# Altium footprint library Connector-Audio-Video.PcbLib: 24 footprints (part 1 of 2)
Each footprint in its own frame and in the unit in brackets; x right, y up, seen from the top. Pads: shape width x height; smd on the part's side, far side on the other; paste and mask are expansions set on the pad; w line width, h text height; cw(c..) or ccw(c..) is an arc to the next point about the centre after c.
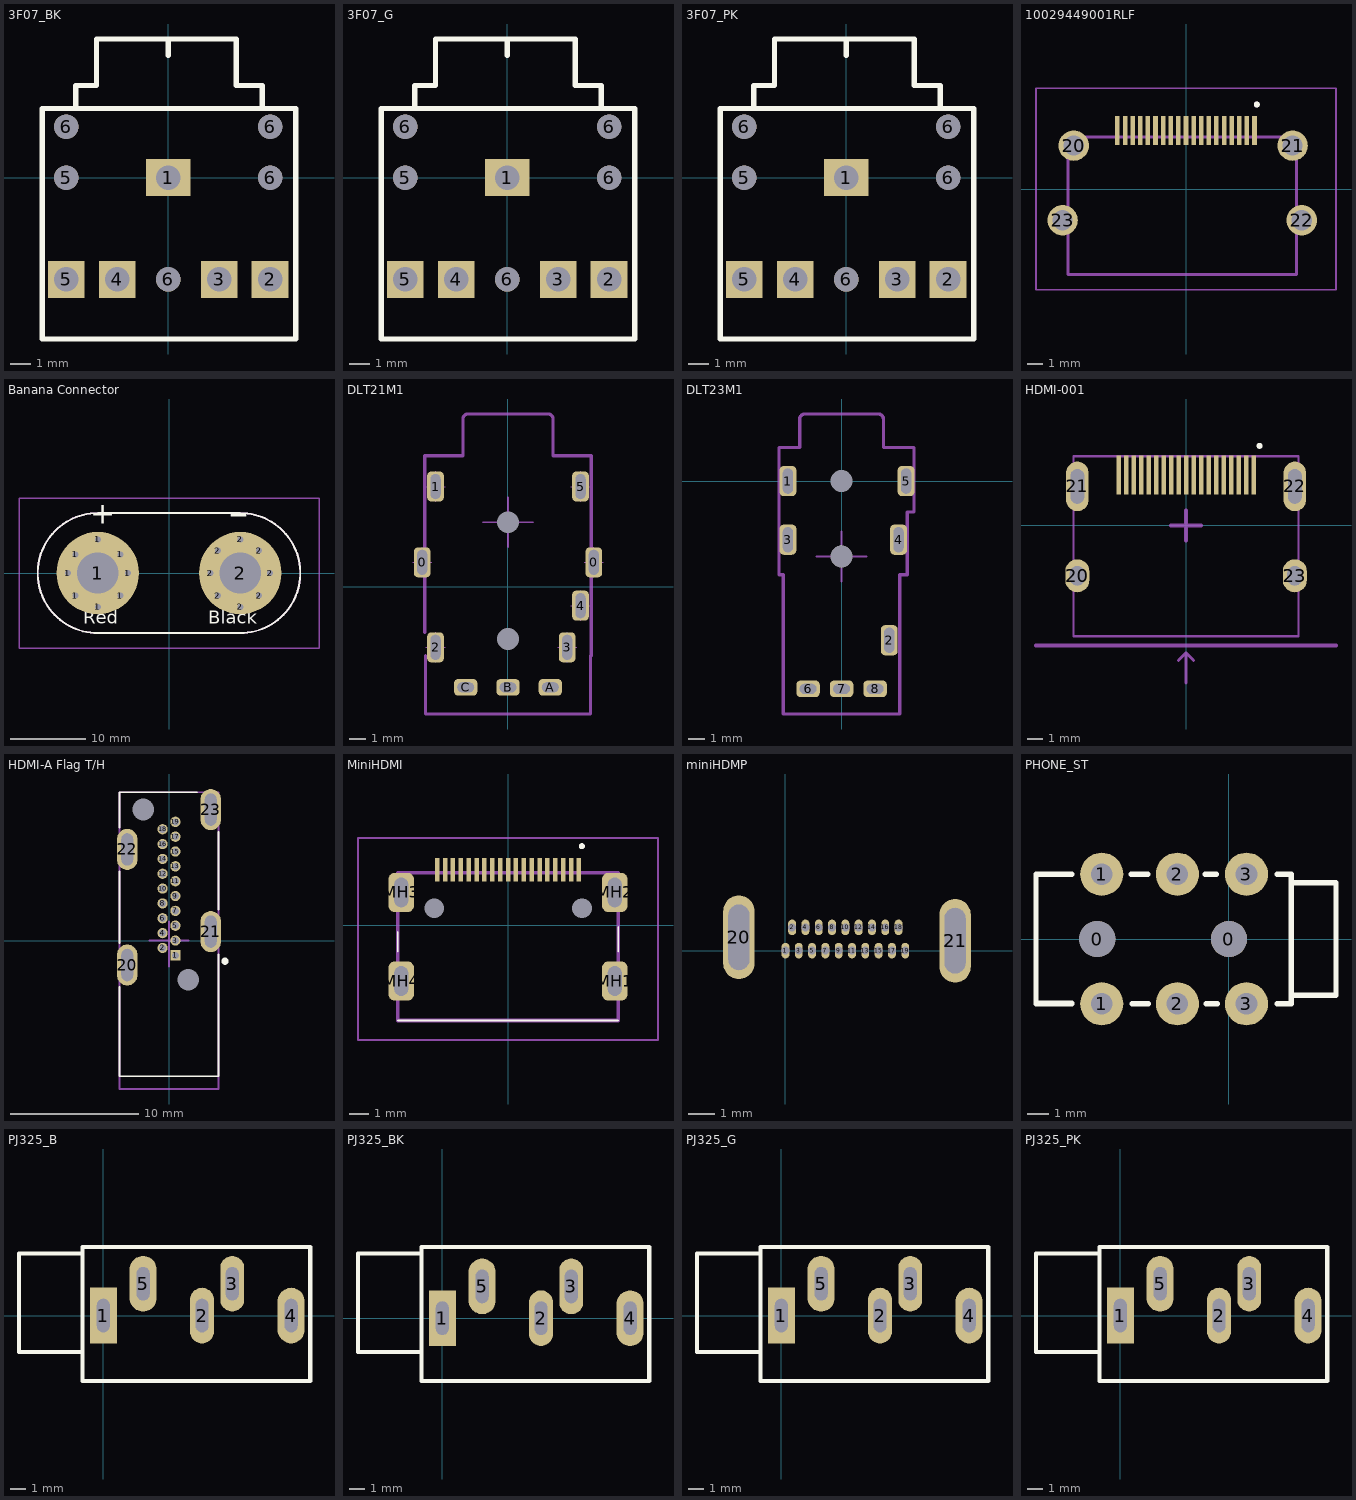
[diagram p0: the footprints below, top view; thin cyan lines are the x and y axes]

## 3F07_BK [mm] "黑色，14.2*12*5mm"
pads (10):
  rect 2.2x1.8 hole 1.2: 1(0,0)
  rect 1.8x1.8 hole 1.2: 2(5,-5) 3(2.5,-5) 4(-2.5,-5) 5(-5,-5)
  round 1.2 hole 1.2 unplated: 5(-5,0) 6(-5,2.5) 6(0,-5) 6(5,0) 6(5,2.5)
Top Overlay:
  lines w0.254: -4.532,3.382 -4.532,4.525 -3.516,4.525 -3.516,6.8 3.342,6.8 3.342,4.525 4.612,4.525 4.612,3.382 ; 0,6 0,6.8 ; -6.183,-7.921 -6.183,3.382 6.263,3.382 6.263,-7.921 -6.183,-7.921
3D body "3F07_BK-.STEP": height 5.6, standoff -2.9, extent -5.969,-7.735 6.031,6.465

## 3F07_G [mm] "绿色，14.2*12*5mm"
pads (10):
  rect 2.2x1.8 hole 1.2: 1(0,0)
  rect 1.8x1.8 hole 1.2: 2(5,-5) 3(2.5,-5) 4(-2.5,-5) 5(-5,-5)
  round 1.2 hole 1.2 unplated: 5(-5,0) 6(-5,2.5) 6(0,-5) 6(5,0) 6(5,2.5)
Top Overlay:
  lines w0.254: -4.532,3.382 -4.532,4.525 -3.516,4.525 -3.516,6.8 3.342,6.8 3.342,4.525 4.612,4.525 4.612,3.382 ; 0,6 0,6.8 ; -6.183,-7.921 6.263,-7.921 6.263,3.382 -6.183,3.382 -6.183,-7.921
3D body "3F07_G-.STEP": height 5.6, standoff -2.9, extent -5.969,-7.735 6.031,6.465

## 3F07_PK [mm] "粉色，14.2*12*5mm"
pads (10):
  rect 2.2x1.8 hole 1.2: 1(0,0)
  rect 1.8x1.8 hole 1.2: 2(5,-5) 3(2.5,-5) 4(-2.5,-5) 5(-5,-5)
  round 1.2 hole 1.2 unplated: 5(-5,0) 6(-5,2.5) 6(0,-5) 6(5,0) 6(5,2.5)
Top Overlay:
  lines w0.254: -4.532,3.382 -4.532,4.525 -3.516,4.525 -3.516,6.8 3.342,6.8 3.342,4.525 4.612,4.525 4.612,3.382 ; 0,6 0,6.8 ; -6.183,-7.921 6.263,-7.921 6.263,3.382 -6.183,3.382 -6.183,-7.921
3D body "3F07_PK-.STEP": height 5.6, standoff -2.9, extent -6.031,-7.608 5.969,6.592

## 10029449001RLF [mm]
pads (23):
  rect 0.3x1.9 smd: 1(4.499,3.85) 2(3.999,3.85) 3(3.499,3.85) 4(2.999,3.85) 5(2.499,3.85) 6(1.999,3.85) 7(1.499,3.85) 8(0.999,3.85) 9(0.499,3.85) 10(-0.001,3.85) 11(-0.501,3.85) 12(-1.001,3.85) 13(-1.501,3.85) 14(-2.001,3.85) 15(-2.501,3.85) 16(-3.001,3.85) 17(-3.501,3.85) 18(-4.001,3.85) 19(-4.501,3.85)
  round 1.995 hole 1.33: 20(-7.366,2.85) 21(6.999,2.85) 22(7.599,-2.05) 23(-8.101,-2.05)
Top Overlay:
  lines w0.3: 4.649,5.5 ccw(c4.649,5.55) 4.649,5.6 ccw(c4.649,5.55) 4.649,5.5
Body Extra:
  lines w0.2: -7.751,-5.6 7.249,-5.6 7.249,3.4 -7.751,3.4 -7.751,-5.6
Bottom Courtyard:
  lines w0.1: -9.848,-6.6 9.848,-6.6 9.848,6.6 -9.848,6.6 -9.848,-6.6
Mechanical 29:
  lines w0.1: -9.848,-6.6 -9.848,6.6 9.848,6.6 9.848,-6.6 -9.848,-6.6
  lines w0.3: 4.649,5.5 cw(c4.649,5.55) 4.649,5.6
3D body "User Library-10029449-001LF.STEP": height 6.28, standoff -1.72, extent -8.354,-5.588 7.846,4.312

## Banana Connector [mm]
pads (18):
  round 1.524 hole 0.8: 1(-13.5,0) 1(-12.5,-3) 1(-12.5,2.5) 1(-9.5,-4.5) 1(-9.5,4.5) 1(-6.5,-3) 1(-6.5,2.5) 1(-5.5,0) 2(5.5,0) 2(6.5,-3) 2(6.5,3) 2(9.5,-4.5) 2(9.5,4.5) 2(12,-3) 2(12,3) 2(13.5,0)
  round 11 hole 5.5: 1(-9.5,0) 2(9.5,0)
Top Overlay:
  lines w0.254: -9.5,8 9.5,8.001 cw(c9.5,0) 9.499,-8.001 -9.5,-8.001 cw(c-9.499,0) -9.499,8.001
  text "Red" at -11.401,-7.372 h3
  text "Black" at 5.222,-7.372 h3
  text "+" at -10.498,5.566 h5
  text "_" at 8.327,7.427 h5
Bottom Overlay:
  lines w0.254: -9.5,8 9.5,8.001 cw(c9.5,0) 9.499,-8.001 -9.5,-8.001 cw(c-9.499,0) -9.499,8.001
Top Component Outline:
  lines w0.254: -9.5,-8.001 cw(c-9.499,0) -9.499,8.001 9.5,8.001 cw(c9.5,0) 9.499,-8.001 -9.5,-8.001
Top Value:
  text "'.Comment'" at -8.64,-1.164 h4
Top Designator:
  text "='.Designator'" at -12.658,-0.838 h4
Top Courtyard:
  lines w0.2: -20,-10 20,-10 20,10 -20,10 -20,-10
3D body "功放链接座子-香蕉座.sldprt": height 29.06, standoff -23.37, extent -18.007,-8.4 17.807,8.364

## DLT21M1 [mm] "3.5 TosLink connector"
pads (12):
  rrect50% 1x1.8 hole 1.5 slot 0.6 at 0 deg unplated: 0(-5.15,1.475) 0(5.15,1.475) 1(-4.35,6.025) 2(-4.35,-3.625) 3(3.55,-3.625) 4(4.35,-1.125) 5(4.35,6.025)
  rrect50% 1.4x1 hole 1 slot 0.6 at 90 deg unplated: A(2.54,-6.025) B(0,-6.025) C(-2.54,-6.025)
  round 0 hole 1.3 unplated: ""(0,-3.125) ""(0,3.875)
Board Outline:
  lines w0.013: -5.728,1.475 -4.572,1.475 ; -5.15,0.57 -5.15,2.38 ; -4.928,-3.625 -3.772,-3.625 ; -4.928,6.025 -3.772,6.025 ; -4.35,-4.53 -4.35,-2.72 ; -4.35,5.12 -4.35,6.93 ; -3.034,-6.025 -2.046,-6.025 ; -2.54,-6.356 -2.54,-5.694 ; -0.494,-6.025 0.494,-6.025 ; 0,-6.356 0,-5.694 ; 2.046,-6.025 3.034,-6.025 ; 2.54,-6.356 2.54,-5.694 ; 2.972,-3.625 4.128,-3.625 ; 3.55,-4.53 3.55,-2.72 ; 3.772,-1.125 4.928,-1.125 ; 3.772,6.025 4.928,6.025 ; 4.35,-2.03 4.35,-0.22 ; 4.35,5.12 4.35,6.93 ; 4.572,1.475 5.728,1.475 ; 5.15,0.57 5.15,2.38
Top Component Outline:
  lines w0.2: -5,-2.725 -5,7.875 -2.7,7.875 -2.7,10.075 cw(c-2.4,10.075) -2.4,10.375 0,10.375 2.4,10.375 cw(c2.4,10.075) 2.7,10.075 2.7,7.875 5,7.875 5,-4.125 4.95,-4.125 4.95,-7.625 -4.95,-7.625 -4.95,-4.125
Top Component Center:
  lines w0.1: -1.5,3.875 1.5,3.875 ; 0,2.375 0,5.375
Top Value:
  text "'.Comment'" at -3.297,1.925 h1.52
Top Designator:
  text "'.Designator'" at -4.367,1.786 h1.52
Top Assembly (Mech20):

## DLT23M1 [mm] "3.5 TosLink connector"
pads (10):
  rrect50% 1x1.8 hole 1.5 slot 0.6 at 0 deg unplated: 1(-3.2,0) 2(2.85,-9.5) 3(-3.2,-3.5) 4(3.4,-3.5) 5(3.85,0)
  rrect50% 1.4x1 hole 1 slot 0.6 at 90 deg unplated: 6(-2,-12.4) 7(0,-12.4) 8(2,-12.4)
  round 0 hole 1.3 unplated: ""(0,-4.5) ""(0,0)
Top Overlay:
  circle w0.013: c0,0 r0.6
  circle w0.013: c0,-4.5 r0.6
  lines w0.013: -3.6,-4.25 -2.8,-4.25 -2.8,-2.75 -3.6,-2.75 -3.6,-4.25 ; -3.6,-0.75 -2.8,-0.75 -2.8,0.75 -3.6,0.75 -3.6,-0.75 ; -2.4,-12.65 -1.6,-12.65 -1.6,-12.15 -2.4,-12.15 -2.4,-12.65 ; -0.4,-12.65 0.4,-12.65 0.4,-12.15 -0.4,-12.15 -0.4,-12.65 ; 1.6,-12.65 2.4,-12.65 2.4,-12.15 1.6,-12.15 1.6,-12.65 ; 2.45,-10.25 3.25,-10.25 3.25,-8.75 2.45,-8.75 2.45,-10.25 ; 3,-4.25 3.8,-4.25 3.8,-2.75 3,-2.75 3,-4.25 ; 3.45,-0.75 4.25,-0.75 4.25,0.75 3.45,0.75 3.45,-0.75
Top Component Outline:
  lines w0.2: -3.73,-5.6 -3.475,-5.6 ; -3.73,-5.6 -3.73,2 ; -3.73,-5.6 -3.475,-5.6 ; -3.73,-5.6 -3.73,2 ; -3.73,2 -2.5,2 ; -3.73,2 -2.5,2 ; -3.475,-13.9 3.475,-13.9 ; -3.475,-13.9 -3.475,-5.6 ; -3.475,-13.9 3.475,-13.9 ; -3.475,-13.9 -3.475,-5.6 ; -2.5,2 -2.5,3.7 ; -2.5,2 -2.5,3.7 ; -2.5,3.7 cw(c-2.2,3.7) -2.2,4 ; -2.5,3.7 cw(c-2.2,3.7) -2.2,4 ; -2.2,4 2.2,4 ; -2.2,4 2.2,4 ; 2.2,4 cw(c2.2,3.7) 2.5,3.7 ; 2.2,4 cw(c2.2,3.7) 2.5,3.7 ; 2.5,2 2.5,3.7 ; 2.5,2 4.32,2 ; 2.5,2 2.5,3.7 ; 2.5,2 4.32,2 ; 3.475,-13.9 3.475,-5.6 ; 3.475,-13.9 3.475,-5.6 ; 3.475,-5.6 3.92,-5.6 ; 3.475,-5.6 3.92,-5.6 ; 3.92,-5.6 3.92,-1.85 ; 3.92,-5.6 3.92,-1.85 ; 3.92,-1.85 4.32,-1.85 ; 3.92,-1.85 4.32,-1.85 ; 4.32,-1.85 4.32,2 ; 4.32,-1.85 4.32,2
Top Component Center:
  lines w0.1: -1.5,-4.5 1.5,-4.5 ; 0,-6 0,-3
Top Value:
  text "'.Comment'" at -3.297,-4.955 h1.52
Top Designator:
  text "'.Designator'" at -4.367,-5.093 h1.52

## HDMI-001 [mm]
pads (23):
  rect 0.3x2.6 smd: 1(4.5,3.36) 2(4,3.36) 3(3.5,3.36) 4(3,3.36) 5(2.5,3.36) 6(2,3.36) 7(1.5,3.36) 8(1,3.36) 9(0.5,3.36) 10(0,3.36) 11(-0.5,3.36) 12(-1,3.36) 13(-1.5,3.36) 14(-2,3.36) 15(-2.5,3.36) 16(-3,3.36) 17(-3.5,3.36) 18(-4,3.36) 19(-4.5,3.36)
  oval 1.6x2.2 hole 1.3 slot 1 at 0 deg: 20(-7.25,-3.36) 23(7.25,-3.36)
  oval 1.5x3.3 hole 2.3 slot 0.9 at 0 deg: 21(-7.25,2.6) 22(7.25,2.6)
Top Overlay:
  lines w0.3: 4.9,5.25 ccw(c4.9,5.3) 4.9,5.35 ccw(c4.9,5.3) 4.9,5.25
Top Component Outline:
  lines w0.152: -7.5,-7.4 -7.5,4.6 7.5,4.6 7.5,-7.4 -7.5,-7.4
  lines w0.2: -0.5,-9 0,-8.5 ; 0,-10.5 0,-8.5 ; 0.5,-9 0,-8.5
  lines w0.254: -10.006,-8.006 9.994,-8.006
Top Component Center:
  lines w0.254: -1,0 1,0 ; 0,-1 0,1
Top Value:
  text "'.Comment'" at -5.4,-0.481 h2.54
Top Designator:
  text "'.Designator'" at -6.9,-0.356 h2.54
3D body "HDMI SMT 19.stp": height 5.98, standoff -2.3, extent -7.5,-7.4 7.5,4.6

## HDMI-A Flag T/H [mm]
pads (25):
  rect 0.8x0.8 hole 0.55: 1(0.5,-1.15)
  round 0.8 hole 0.55: 2(-0.5,-0.572) 3(0.5,0.005) 4(-0.5,0.583) 5(0.5,1.16) 6(-0.5,1.738) 7(0.5,2.315) 8(-0.5,2.893) 9(0.5,3.47) 10(-0.5,4.048) 11(0.5,4.625) 12(-0.5,5.203) 13(0.5,5.78) 14(-0.5,6.358) 15(0.5,6.935) 16(-0.5,7.513) 17(0.5,8.09) 18(-0.5,8.668) 19(0.5,9.245)
  oval 1.6x3.2 hole 0.9 slot 2.5 at 90 deg: 20(-3.25,-1.9) 21(3.25,0.7) 22(-3.25,7.1) 23(3.25,10.2)
  round 1 hole 1.7 unplated: None(-2,10.2) None(1.5,-3.05)
Top Overlay:
  circle w0.28: c4.353,-1.6 r0.14
  lines w0.127: -3.85,-3.6 -3.85,-10.55 3.85,-10.55 3.85,-1.05 ; -3.85,-0.2 -3.85,5.4 ; -3.85,8.8 -3.85,11.55 2.203,11.55 ; 3.85,2.4 3.85,8.45
Board Outline:
  lines w0: -3.7,-2.8 -3.7,-1 ; -3.7,-2.798 ccw(c-3.24,-2.79) -3.232,-3.25 ccw(c-3.24,-2.81) -2.8,-2.802 ; -3.7,-1.002 cw(c-3.24,-1.01) -3.232,-0.55 cw(c-3.24,-0.99) -2.8,-0.998 ; -3.7,6.2 -3.7,8 ; -3.7,6.202 ccw(c-3.24,6.21) -3.232,5.75 ccw(c-3.24,6.19) -2.8,6.198 ; -3.7,7.998 cw(c-3.24,7.99) -3.232,8.45 cw(c-3.24,8.01) -2.8,8.002 ; -2.8,-2.8 -2.8,-1 ; -2.8,6.2 -2.8,8 ; 3.7,-0.2 cw(c3.243,-0.192) 3.235,-0.65 cw(c3.243,-0.208) 2.8,-0.2 2.8,1.6 cw(c3.243,1.607) 3.235,2.05 cw(c3.243,1.593) 3.7,1.6 3.7,-0.2 ; 3.7,9.3 cw(c3.243,9.307) 3.235,8.85 cw(c3.243,9.293) 2.8,9.3 2.8,11.1 cw(c3.243,11.107) 3.235,11.55 cw(c3.243,11.093) 3.7,11.1 ; 3.7,9.3 3.7,11.1
Top Component Outline:
  lines w0.127: -3.85,-11.55 3.85,-11.55 ; -3.85,-11.55 3.85,-11.55 ; -3.85,-11.55 -3.85,11.55 ; -3.85,-11.55 -3.85,11.55 ; -3.85,11.55 3.85,11.55 ; -3.85,11.55 3.85,11.55 ; 3.85,-11.55 3.85,-10.55 ; 3.85,-11.55 3.85,-10.55 ; 3.85,-10.55 3.85,11.55 ; 3.85,-10.55 3.85,11.55
Top Component Center:
  lines w0.152: -1.5,0 1.5,0 ; 0,-2 0,1.5
Top Value:
  text "'.Comment'" at 0.581,-4.314 h2
Top Designator:
  text "'.Designator'" at 0.418,-5.72 h2
3D body "HDMI-TYPEA TH.stp": height 16.4, standoff -3.75, extent -3.89,-11.43 3.85,11.647

## MiniHDMI [mm] "Mini HDMI ATOM(爱特姆)  厂家型号： HD219F-3D05200"
pads (25):
  rect 0.23x1.2 smd: 1(3.605,2.825) 2(3.205,2.825) 3(2.805,2.825) 4(2.405,2.825) 5(2.005,2.825) 6(1.605,2.825) 7(1.205,2.825) 8(0.805,2.825) 9(0.405,2.825) 10(0.005,2.825) 11(-0.395,2.825) 12(-0.795,2.825) 13(-1.195,2.825) 14(-1.595,2.825) 15(-1.995,2.825) 16(-2.395,2.825) 17(-2.795,2.825) 18(-3.195,2.825) 19(-3.595,2.825)
  rrect50% 1.3x2 hole 1.5 slot 0.7 at 0 deg: MH1(5.425,-2.825) MH2(5.425,1.675) MH3(-5.425,1.675) MH4(-5.425,-2.825)
  round 0.5 hole 1 unplated: MH5(3.755,0.875) MH6(-3.745,0.875)
Top Overlay:
  lines w0.1: -5.6,-4.825 5.6,-4.825 -5.6,-4.825 ; -5.6,-1.325 -5.6,-0.325 -5.6,-1.325 ; 5.6,-1.325 5.6,-0.075 5.6,-1.325
  lines w0.2: 3.7,4.025 cw(c3.75,4.025) 3.8,4.025 ; 3.7,4.025 ccw(c3.75,4.025) 3.8,4.025 ; 3.7,4.025 3.8,4.025
Body Extra:
  lines w0.2: -5.6,-4.825 -5.6,2.675 5.6,2.675 5.6,-4.825 -5.6,-4.825
Bottom Courtyard:
  lines w0.1: -7.62,-5.825 -7.62,4.445 7.62,4.445 7.62,-5.825 -7.62,-5.825
Mechanical 29:
  lines w0.1: -7.62,-5.825 7.62,-5.825 7.62,4.445 -7.62,4.445 -7.62,-5.825
  lines w0.2: 3.7,4.025 3.8,4.025
3D body "Mini HDMI.stp": height 3.6, standoff -0.45, extent -5.6,-5.393 5.6,2.307

## miniHDMP [mm]
pads (21):
  oval 0.3x0.6 hole 0.3: 1(0,0) 2(0.254,0.889) 3(0.508,0) 4(0.762,0.889) 5(1.016,0) 6(1.27,0.889) 7(1.524,0) 8(1.778,0.889) 9(2.032,0) 10(2.286,0.889) 11(2.54,0) 12(2.794,0.889) 13(3.048,0) 14(3.302,0.889) 15(3.556,0) 16(3.81,0.889) 17(4.064,0) 18(4.318,0.889) 19(4.572,0)
  oval 1.2x3.2 hole 2.5 slot 0.8 at 0 deg: 20(-1.778,0.508) 21(6.477,0.381)

## PHONE_ST [mm]
pads (8):
  round 1.676 hole 1.676: 0(-6.096,0) 0(0,0)
  round 2 hole 1: 1(-5.89,-3) 1(-5.89,3) 2(-2.39,-3) 2(-2.39,3) 3(0.81,-3) 3(0.81,3)
Top Overlay:
  lines w0.254: -8.933,-2.969 -7.282,-2.969 ; -7.282,-3.007 -8.933,-3.007 -8.933,3 -7.282,3 ; -4.526,3 -3.764,3 ; -4.488,-3.007 -3.726,-3.007 ; -1.097,3 -0.589,3 ; -1.059,-3.007 -0.551,-3.007 ; 2.243,-3.007 2.79,-3.007 ; 2.243,3 2.878,3 2.878,-3.007 ; 2.878,-2.6 4.953,-2.6 4.953,2.6 2.878,2.6

## PJ325_B [mm] "蓝色，18*8.1*12.3mm"
pads (5):
  rect 1.7x3.5 hole 0.8 slot 2.1 at 90 deg: 1(0,0)
  oval 1.5x3.5 hole 0.8 slot 2.1 at 90 deg: 2(6.2,0) 3(8.1,2)
  oval 1.7x3.5 hole 0.8 slot 2.1 at 90 deg: 4(11.8,0) 5(2.5,2)
Top Overlay:
  lines w0.254: -1.3,-2.3 -5.3,-2.3 -5.3,3.9 -1.3,3.9 ; -1.3,-4.1 13,-4.1 13,4.3 -1.3,4.3 -1.3,-4.1
3D body "PJ325_B-.STEP": height 12.35, standoff -2.9, extent -5.203,-3.923 12.827,4.177

## PJ325_BK [mm] "黑色，18*8.1*12.3mm"
pads (5):
  rect 1.7x3.5 hole 0.8 slot 2.1 at 90 deg: 1(0,0)
  oval 1.5x3.5 hole 0.8 slot 2.1 at 90 deg: 2(6.2,0) 3(8.1,2)
  oval 1.7x3.5 hole 0.8 slot 2.1 at 90 deg: 4(11.8,0) 5(2.5,2)
Top Overlay:
  lines w0.254: -1.3,-2.136 -5.3,-2.136 -5.3,4.064 -1.3,4.064 ; -1.3,-3.936 -1.3,4.464 13,4.464 13,-3.936 -1.3,-3.936
3D body "PJ325_BK-.STEP": height 12.35, standoff -2.9, extent -5.203,-3.923 12.827,4.177

## PJ325_G [mm] "绿色，18*8.1*12.3mm"
pads (5):
  rect 1.7x3.5 hole 0.8 slot 2.1 at 90 deg: 1(0,0)
  oval 1.5x3.5 hole 0.8 slot 2.1 at 90 deg: 2(6.2,0) 3(8.1,2)
  oval 1.7x3.5 hole 0.8 slot 2.1 at 90 deg: 4(11.8,0) 5(2.5,2)
Top Overlay:
  lines w0.254: -1.3,-2.3 -5.3,-2.3 -5.3,3.9 -1.3,3.9 ; -1.3,-4.1 -1.3,4.3 13,4.3 13,-4.1 -1.3,-4.1
3D body "PJ325_G-.STEP": height 12.35, standoff -2.9, extent -5.205,-3.937 12.825,4.163

## PJ325_PK [mm] "粉色，18*8.1*12.3mm"
pads (5):
  rect 1.7x3.5 hole 0.8 slot 2.1 at 90 deg: 1(0,0)
  oval 1.5x3.5 hole 0.8 slot 2.1 at 90 deg: 2(6.2,0) 3(8.1,2)
  oval 1.7x3.5 hole 0.8 slot 2.1 at 90 deg: 4(11.8,0) 5(2.5,2)
Top Overlay:
  lines w0.254: -1.3,-2.3 -5.3,-2.3 -5.3,3.9 -1.3,3.9 ; -1.3,-4.1 13,-4.1 13,4.3 -1.3,4.3 -1.3,-4.1
3D body "PJ325_PK-.STEP": height 12.35, standoff -2.9, extent -5.205,-3.909 12.825,4.191